# Altium integrated library SMBJ36A.IntLib: 1 symbol
Pins are listed as number, name and electrical type; pins without a type are passive.

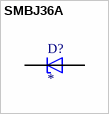
[diagram p0: symbol SMBJ36A]

## SMBJ36A
designator D?
58.1V Clamp 10.4A Ipp Tvs Diode Surface Mount DO-214AA (SMBJ); MF: Littelfuse Inc.; MP: SMBJ36A; SnapEDA_Link: https://www.snapeda.com/parts/SMBJ36A/Littelfuse/view-part/?ref=snap; Package: DO-214AA Littelfuse; Value: *; Check_prices: https://www.snapeda.com/parts/SMBJ36A/Littelfuse/view-part/?ref=eda
footprint DIOM4336X265N
pins: A, C